# Altium footprint library 10144041-10011LF.PcbLib: 1 footprints
Each footprint in its own frame and in the unit in brackets; x right, y up, seen from the top. Pads: shape width x height; smd on the part's side, far side on the other; paste and mask are expansions set on the pad; w line width, h text height; cw(c..) or ccw(c..) is an arc to the next point about the centre after c.
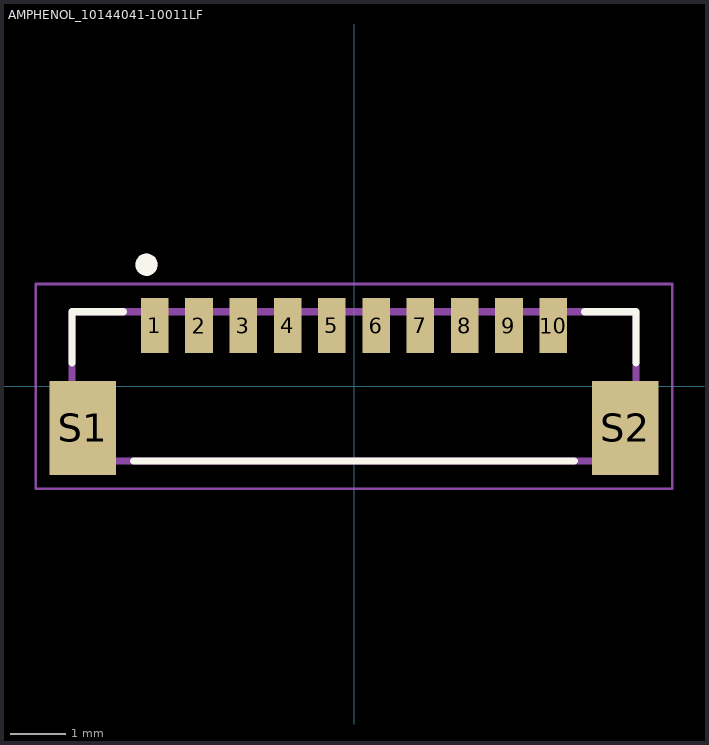
[diagram p0: the footprint, top view; thin cyan lines are the x and y axes]

## AMPHENOL_10144041-10011LF [mm]
pads (12):
  rect 0.5x1 smd: 1(-3.6,1.1) 2(-2.8,1.1) 3(-2,1.1) 4(-1.2,1.1) 5(-0.4,1.1) 6(0.4,1.1) 7(1.2,1.1) 8(2,1.1) 9(2.8,1.1) 10(3.6,1.1)
  rect 1.2x1.7 smd: S1(-4.9,-0.75) S2(4.9,-0.75)
Top Overlay:
  circle w0.2: c-3.75,2.2 r0.1
  lines w0.127: -5.1,0.42 -5.1,1.35 -4.17,1.35 ; -3.98,-1.35 3.98,-1.35 ; 4.17,1.35 5.1,1.35 5.1,0.42
Mechanical 13:
  circle w0.2: c-3.75,2.2 r0.1
  lines w0.127: -5.1,-1.35 5.1,-1.35 5.1,1.35 -5.1,1.35 -5.1,-1.35
Mechanical 15:
  lines w0.05: -5.75,-1.85 5.75,-1.85 5.75,1.85 -5.75,1.85 -5.75,-1.85
3D body "step_temp.STEP": height 1.72, standoff 0, extent -5.1,-1.35 5.1,1.35